# Altium schematic symbol library SystemCarrier_Local.SchLib: 8 symbols
Pins are listed as number, name and electrical type; pins without a type are passive.

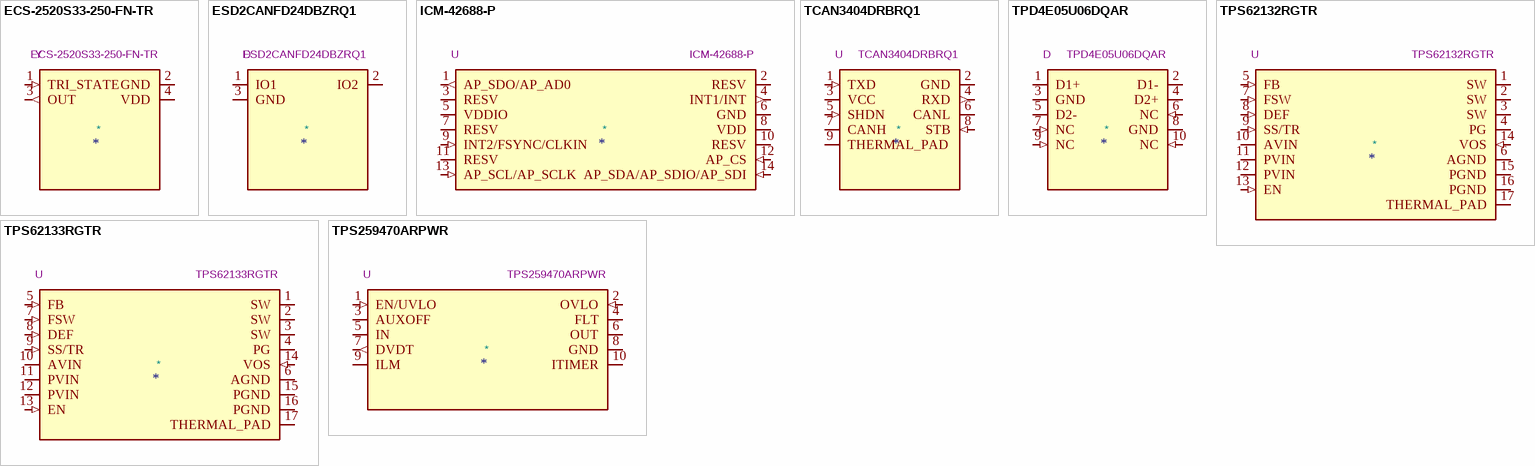
[diagram p0: symbols ECS-2520S33-250-FN-TR to TPS259470ARPWR]

## ECS-2520S33-250-FN-TR
designator *  value ECS-2520S33-250-FN-TR  Reference: Y
Generated from SYMBOL_PIN_CONTRACT_SYS_001.csv for ECS-2520S33-250-FN-TR; Footprint: Oscillator:Oscillator_SMD_ECS_2520MV-xxx-xx-4Pin_2.5x2.0mm; Description_: Generated from SYMBOL_PIN_CONTRACT_SYS_001.csv for ECS-2520S33-250-FN-TR
pins: 1 TRI_STATE (in), 2 GND (power), 3 OUT (out), 4 VDD (power)

## ESD2CANFD24DBZRQ1
designator *  value ESD2CANFD24DBZRQ1  Reference: D
Generated from SYMBOL_PIN_CONTRACT_SYS_001.csv for ESD2CANFD24DBZRQ1; Footprint: Package_TO_SOT_SMD:SOT-23; Description_: Generated from SYMBOL_PIN_CONTRACT_SYS_001.csv for ESD2CANFD24DBZRQ1
pins: 1 IO1 (io), 2 IO2 (io), 3 GND

## ICM-42688-P
designator *  value ICM-42688-P  Reference: U
Generated from SYMBOL_PIN_CONTRACT_SYS_001.csv for ICM-42688-P; Footprint: SystemCarrier_Local:ICM-42688-P_LGA14_2.5x3mm_P0.5mm; Description_: Generated from SYMBOL_PIN_CONTRACT_SYS_001.csv for ICM-42688-P
pins: 1 AP_SDO/AP_AD0 (out), 2 RESV, 3 RESV, 4 INT1/INT (out), 5 VDDIO (power), 6 GND (power), 7 RESV, 8 VDD (power), 9 INT2/FSYNC/CLKIN (in), 10 RESV, 11 RESV, 12 AP_CS (in), 13 AP_SCL/AP_SCLK (in), 14 AP_SDA/AP_SDIO/AP_SDI (in)

## TCAN3404DRBRQ1
designator *  value TCAN3404DRBRQ1  Reference: U
Generated from SYMBOL_PIN_CONTRACT_SYS_001.csv for TCAN3404DRBRQ1; Footprint: Package_DFN_QFN:Texas_DRB0008A; Description_: Generated from SYMBOL_PIN_CONTRACT_SYS_001.csv for TCAN3404DRBRQ1
pins: 1 TXD (in), 2 GND (power), 3 VCC (power), 4 RXD (out), 5 SHDN (in), 6 CANL (io), 7 CANH (io), 8 STB (in), 9 THERMAL_PAD (power)

## TPD4E05U06DQAR
designator *  value TPD4E05U06DQAR  Reference: D
Generated from SYMBOL_PIN_CONTRACT_SYS_001.csv for TPD4E05U06DQAR; Footprint: Package_SON:USON-10_2.5x1.0mm_P0.5mm; Description_: Generated from SYMBOL_PIN_CONTRACT_SYS_001.csv for TPD4E05U06DQAR
pins: 1 D1+ (io), 2 D1- (io), 3 GND, 4 D2+ (io), 5 D2- (io), 6 NC (in), 7 NC (in), 8 GND, 9 NC (in), 10 NC (in)

## TPS62132RGTR
designator *  value TPS62132RGTR  Reference: U
Generated from SYMBOL_PIN_CONTRACT_SYS_001.csv for TPS62132RGTR; Footprint: Package_DFN_QFN:VQFN-16-1EP_3x3mm_P0.5mm_EP1.68x1.68mm; Description_: Generated from SYMBOL_PIN_CONTRACT_SYS_001.csv for TPS62132RGTR
pins: 1 SW, 2 SW, 3 SW, 4 PG (oc), 5 FB (in), 6 AGND (power), 7 FSW (in), 8 DEF (in), 9 SS/TR (in), 10 AVIN (power), 11 PVIN (power), 12 PVIN (power), 13 EN (in), 14 VOS (in), 15 PGND (power), 16 PGND (power), 17 THERMAL_PAD (power)

## TPS62133RGTR
designator *  value TPS62133RGTR  Reference: U
Generated from SYMBOL_PIN_CONTRACT_SYS_001.csv for TPS62133RGTR; Footprint: Package_DFN_QFN:VQFN-16-1EP_3x3mm_P0.5mm_EP1.68x1.68mm; Description_: Generated from SYMBOL_PIN_CONTRACT_SYS_001.csv for TPS62133RGTR
pins: 1 SW, 2 SW, 3 SW, 4 PG (oc), 5 FB (in), 6 AGND (power), 7 FSW (in), 8 DEF (in), 9 SS/TR (in), 10 AVIN (power), 11 PVIN (power), 12 PVIN (power), 13 EN (in), 14 VOS (in), 15 PGND (power), 16 PGND (power), 17 THERMAL_PAD (power)

## TPS259470ARPWR
designator *  value TPS259470ARPWR  Reference: U
Generated from SYMBOL_PIN_CONTRACT_SYS_001.csv for TPS259470ARPWR; Footprint: SystemCarrier_Local:TPS259470A_RPW0010A_VQFN-HR-10_2x2mm_P0.475mm; Description_: Generated from SYMBOL_PIN_CONTRACT_SYS_001.csv for TPS259470ARPWR
pins: 1 EN/UVLO (in), 2 OVLO (in), 3 AUXOFF (oc), 4 FLT (oc), 5 IN (power), 6 OUT (power), 7 DVDT (out), 8 GND (power), 9 ILM (io), 10 ITIMER (io)